# Altium footprint library FT8.PcbLib: 40 footprints (part 1 of 3)
Each footprint in its own frame and in the unit in brackets; x right, y up, seen from the top. Pads: shape width x height; smd on the part's side, far side on the other; paste and mask are expansions set on the pad; w line width, h text height; cw(c..) or ccw(c..) is an arc to the next point about the centre after c.
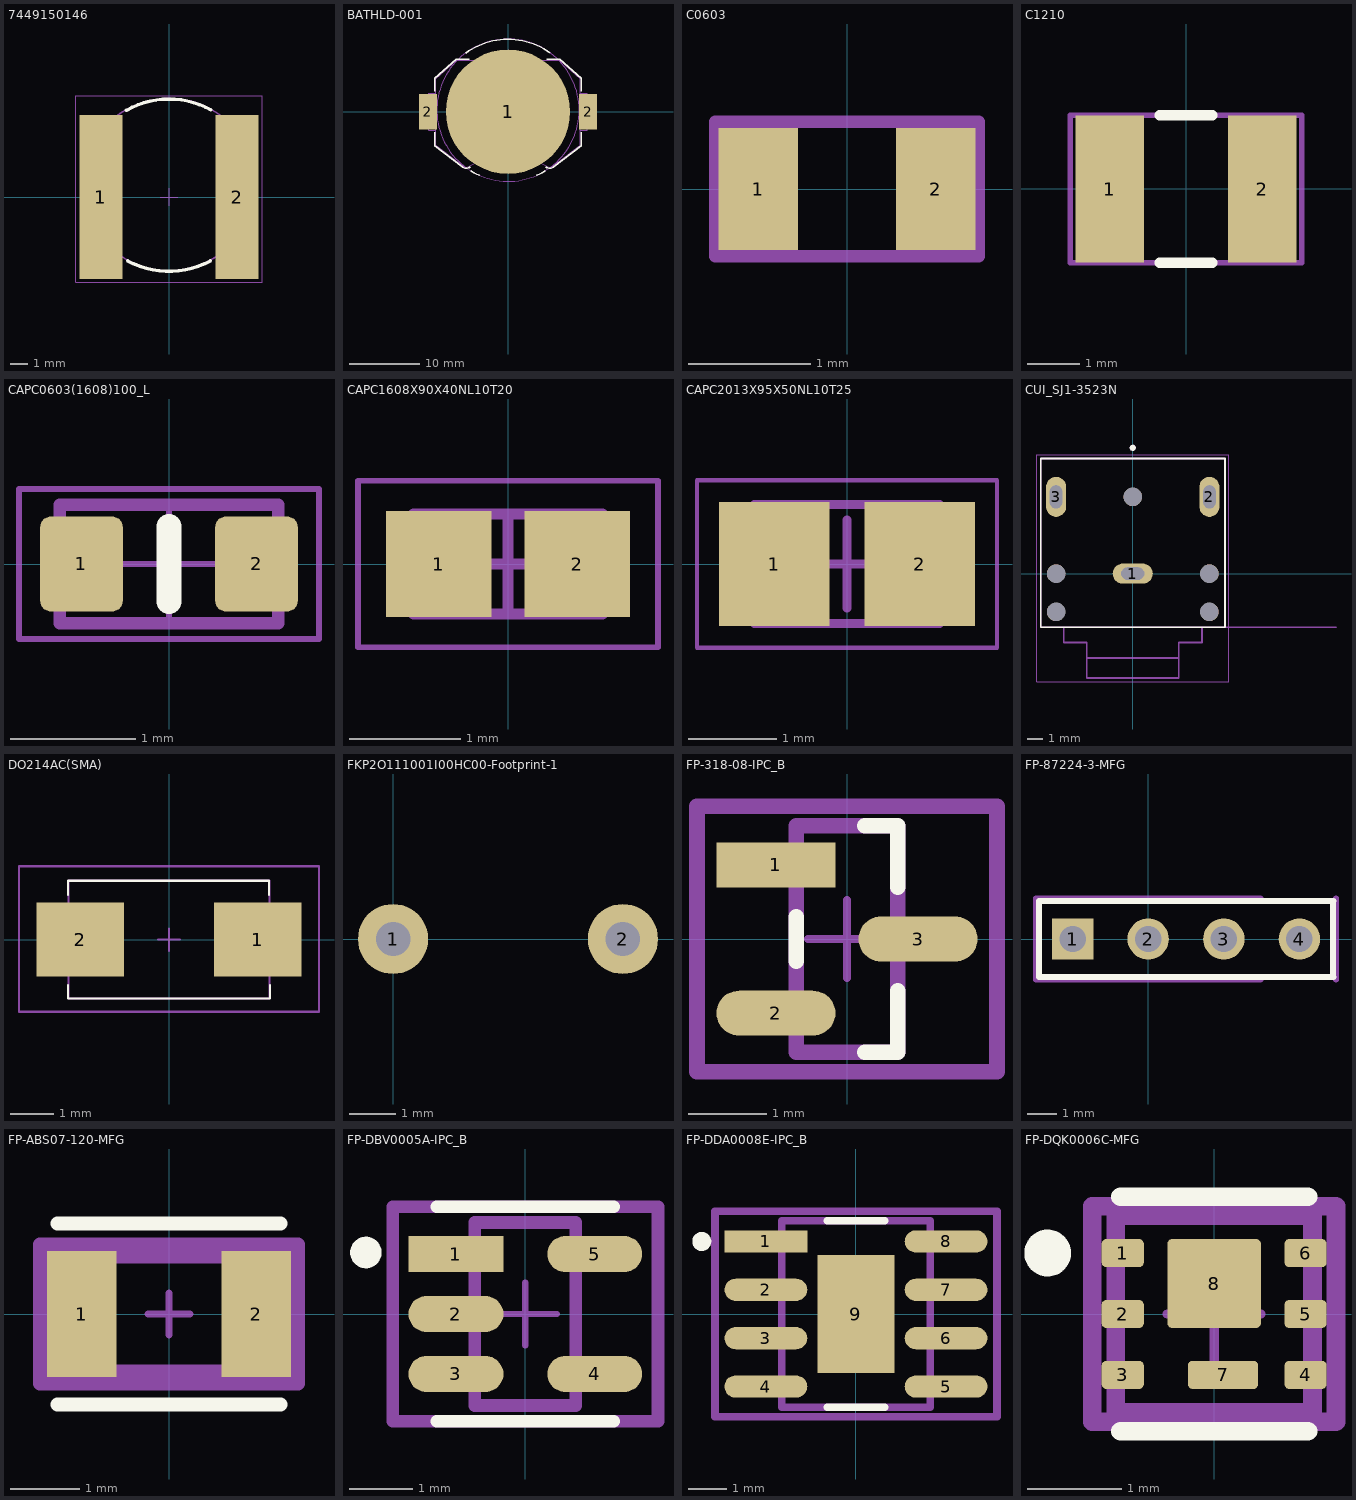
[diagram p0: the footprints below, top view; thin cyan lines are the x and y axes]

## 7449150146 [mm] "Air Coil High Current Inductor, size 1010"
height 6.5
pads (2):
  rect 2.5x9.5 smd: 1(-3.95,0) 2(3.95,0)
Top Overlay:
  lines w0.2: -2.474,5.03 cw(c0,0.685) 2.43,5.055 ; -2.401,-3.701 ccw(c0,0.685) 2.401,-3.701
Top 3D Body:
  circle w0.1: c0,0.725 r5
  lines w0.1: -3.525,4.275 -5,4.275 -5,-4.275 -3.2,-4.275 -3.2,-3.15 ; 3.2,-3.15 3.2,-4.275 5,-4.275 5,4.275 3.525,4.275
Top Designator:
  text ".Designator" at -7.498,-0.5 h1.5
Top Courtyard:
  lines w0.05: -0.5,0 0.5,0 ; 0,-0.5 0,0.5 ; -5.4,-4.95 5.4,-4.95 5.4,5.885 -5.4,5.885 -5.4,-4.95
Top Component Outline:
  circle w0.1: c0,0.725 r5
  lines w0.1: -3.525,4.275 -5,4.275 -5,-4.275 -3.2,-4.275 -3.2,-3.15 ; 3.2,-3.15 3.2,-4.275 5,-4.275 5,4.275 3.525,4.275
3D body "7449150146.stp": height 6.26, standoff 0.01, extent -5,-4.275 5,5.725

## BATHLD-001 [mm] "LINX CR2032 BATTERY HOLDER"
height 4.3
pads (3):
  round 17.78 smd: 1(0,0)
  rect 2.54x5.08 smd: 2(-11.43,0) 2(11.43,0)
Top Overlay:
  lines w0.2: -10.466,-2.94 -10.466,-4.853 -6.545,-7.854 ; -10.466,2.94 -10.466,4.785 -7.425,7.475 -5.515,7.476 ; -6.545,-7.854 ccw(c-5.97,-7.277) -5.561,-7.982 cw(c0.254,-19.539) -5.394,-7.899 ; -6.041,8.364 cw(c0,0.19) 5.977,8.411 ; -5.313,-8.454 ccw(c0,0.215) -4.054,-9.109 ; 4.054,-9.109 ccw(c0,0.215) 5.313,-8.454 ; 5.394,-7.899 cw(c-0.254,-19.539) 5.561,-7.982 ccw(c5.97,-7.277) 6.545,-7.854 ; 5.515,7.476 7.425,7.475 10.466,4.785 10.466,2.94 ; 6.545,-7.854 10.466,-4.853 ; 10.466,-4.852 10.466,-2.94
Mechanical 1:
  circle w0.1: c0,0.215 r10.168
Top Assembly:
  lines w0.1: -10.326,-2.625 -11.316,-2.625 -11.316,-0.525 -10.316,-0.525 ; -10.316,0.525 -11.316,0.525 -11.316,2.625 -10.316,2.625 ; -6.038,-8.055 cw(c-0.031,-19.513) 6.013,-8.074 ; -6.038,-8.056 -10.316,-4.775 -10.316,4.725 -7.366,7.325 7.366,7.325 10.316,4.725 10.316,-4.775 6.013,-8.075 ; 10.316,-0.525 11.316,-0.525 11.316,-2.625 10.326,-2.625 ; 10.316,0.525 11.316,0.525 11.316,2.625 10.316,2.625
Top Courtyard:
  lines w0.1: -0.5,0 0.5,0 ; 0,-0.5 0,0.5
3D body: height 4, standoff 0, extent -10.168,-9.953 10.168,10.383
3D body: height 4.3, standoff 0, extent -10.317,-8.075 10.317,7.326

## C0603 [mm]
pads (2):
  rect 0.65x1 smd: 1(-0.725,0) 2(0.725,0)
Bottom 3D Body:
  text ".Comment" at -0.6,-0.3 h0.8
Mechanical 7:
  text ".Designator" at -0.7,-0.3 h0.8
Top Courtyard:
  lines w0.1: -1.075,-0.55 -1.075,0.55 1.075,0.55 1.075,-0.55 -1.075,-0.55
3D body "cap_cera_0603.step": height 0.8, standoff 0, extent -0.8,-0.4 0.8,0.4

## C1210 [mm]
pads (2):
  rect 1.3x2.8 smd: 1(-1.45,0) 2(1.45,0)
Top Overlay:
  lines w0.2: -0.5,-1.4 0.5,-1.4 ; -0.5,1.4 0.5,1.4
Bottom 3D Body:
  text ".Comment" at 0.55,0.35 h0.8
Mechanical 7:
  text ".Designator" at 0.9,0.4 h0.8
Top Courtyard:
  lines w0.1: -2.2,-1.4 -2.2,1.4 2.2,1.4 2.2,-1.4 -2.2,-1.4
3D body "cap_cera_1210.step": height 2.5, standoff 0, extent -1.6,-1.25 1.6,1.25

## CAPC0603(1608)100_L [mm] "Chip Capacitor, Body 1.6x0.8mm, Height 1.0mm, IPC High Density"
height 1
pads (2):
  rrect25% 0.66x0.76 smd: 1(-0.7,0) 2(0.7,0)
Top Overlay:
  lines w0.2: 0,-0.3 0,0.3
Top Designator:
  text ".Designator" at -1.27,-0.127 h0.6
Top Assembly:
  lines w0.1: -0.875,-0.475 -0.875,0.475 0.875,0.475 0.875,-0.475 -0.875,-0.475
Top Courtyard:
  lines w0.05: -0.475,0 0.475,0 ; 0,-0.475 0,0.475 ; -1.2,-0.6 1.2,-0.6 1.2,0.6 -1.2,0.6 -1.2,-0.6
3D body "CAPC1608X95N EIA 0603.STEP": height 0.95, standoff 0, extent -0.8,-0.4 0.8,0.4

## CAPC1608X90X40NL10T20 [mm] "Chip Capacitor, 2-Leads, Body 1.70x0.90mm, IPC Medium Density"
height 0.9
pads (2):
  rect 0.95x0.95 smd: 1(-0.625,0) 2(0.625,0)
Top Assembly:
  lines w0.1: -0.85,-0.45 -0.85,0.45 0.85,0.45 0.85,-0.45 -0.85,-0.45
Top Courtyard:
  lines w0.05: -1.35,-0.75 -1.35,0.75 1.35,0.75 1.35,-0.75 -1.35,-0.75
  lines w0.1: -0.45,0 0.45,0 ; 0,-0.45 0,0.45
3D body "CAPC1608X09N.step": height 0.9, standoff 0, extent -0.85,-0.45 0.85,0.45

## CAPC2013X95X50NL10T25 [mm] "Chip Capacitor, 2-Leads, Body 2.10x1.35mm, IPC Medium Density"
height 0.95
pads (2):
  rect 1.25x1.4 smd: 1(-0.825,0) 2(0.825,0)
Top Assembly:
  lines w0.1: -1.05,-0.675 1.05,-0.675 1.05,0.675 -1.05,0.675 -1.05,-0.675
Top Courtyard:
  lines w0.05: -1.7,-0.95 1.7,-0.95 1.7,0.95 -1.7,0.95 -1.7,-0.95
  lines w0.1: -0.5,0 0.5,0 ; 0,-0.5 0,0.5
3D body "CAPC2012X09N.step": height 0.95, standoff 0, extent -1.05,-0.675 1.05,0.675

## CUI_SJ1-3523N [mm]
height 6.25
pads (8):
  oval 2.616x1.308 hole 0.8 slot 1.5 at 0 deg: 1(0,0)
  oval 1.308x2.616 hole 0.8 slot 1.5 at 90 deg: 2(5,5) 3(-5,5)
  round 1.2 hole 1.2 unplated: ""(-5,-2.5) ""(-5,0) ""(0,5) ""(5,-2.5) ""(5,0)
Top Overlay:
  circle w0.2: c0,8.2 r0.1
  lines w0.127: -6,-3.5 -6,7.5 6,7.5 6,-3.5 -6,-3.5
Top Assembly:
  circle w0.2: c0,8.2 r0.1
  lines w0.127: 13.25,-3.5 6,-3.5 ; -4.5,-3.5 -6,-3.5 -6,7.5 6,7.5 6,-3.5 ; -4.5,-3.5 4.5,-3.5 ; -4.5,-3.5 -4.5,-4.5 -3,-4.5 -3,-5.5 ; -3,-5.5 -3,-6.8 3,-6.8 3,-5.5 ; -3,-5.5 3,-5.5 ; 3,-5.5 3,-4.5 4.5,-4.5 4.5,-3.5 ; 4.5,-3.5 6,-3.5
  text "PCB EDGE" at 7,-3.25 h0.81
Top Courtyard:
  lines w0.05: -6.25,-7.05 6.25,-7.05 6.25,7.75 -6.25,7.75 -6.25,-7.05
3D body "SJ1-3523N--3DModel-STEP-1.STEP": height 5.8, standoff -2.7, extent -6,-6.807 6,7.493

## DO214AC(SMA) [mm] "Magnetic-Core Inductor with Winding Polarity Marking; 2 Leads"
height 0.55
pads (2):
  rect 2x1.7 smd: 1(2.025,0) 2(-2.025,0)
Top Overlay:
  lines w0.05: -2.311,-1.041 -2.311,-1.346 2.311,-1.346 2.311,-1.041 ; -2.311,1.016 -2.311,1.346 2.286,1.346 2.286,1.016
Mechanical 1:
  lines w0.05: -2.3,-1.35 2.3,-1.35 2.3,1.35 -2.3,1.35 -2.3,-1.35
Top Courtyard:
  lines w0.05: -0.254,0 0.254,0 ; 0,-0.254 0,0.254 ; -3.429,-1.651 3.429,-1.651 3.429,1.676 -3.429,1.676 -3.429,-1.651
3D body "DO-214AC.STEP": height 2.4, standoff 0, extent -2.3,-1.35 2.3,1.35

## FKP2O111001I00HC00-Footprint-1 [mil]
pads (2):
  round 60 hole 29.53: 1(0,0) 2(196.85,0)

## FP-318-08-IPC_B [mm]
pads (3):
  rect 1.524x0.578 smd paste+0 mask+0: 1(-0.91,0.95)
  rrect100% 1.524x0.578 smd paste+0 mask+0: 2(-0.91,-0.95) 3(0.91,0)
Top Overlay:
  lines w0.2: -0.65,-0.286 -0.65,0.286 ; 0.227,-1.45 0.65,-1.45 0.65,-0.664 ; 0.227,1.45 0.65,1.45 0.65,0.664
Top 3D Body:
  lines w0.2: -0.65,-1.45 0.65,-1.45 0.65,1.45 -0.65,1.45 -0.65,-1.45
Top Component Center:
  lines w0.1: -0.5,0 0.5,0 ; 0,-0.5 0,0.5
Top Assembly:
  lines w0.2: -1.922,-1.7 1.922,-1.7 1.922,1.7 -1.922,1.7 -1.922,-1.7
  text ".Designator" at 0,-0.001 h1
Top Courtyard:
  lines w0.2: -1.922,-1.7 1.922,-1.7 1.922,1.7 -1.922,1.7 -1.922,-1.7
3D body "Trans_ON_Semiconductor_2N7002K_eec.STEP": height 0.25, standoff 0, extent -1.922,-1.7 1.922,1.7

## FP-87224-3-MFG [mil]
pads (4):
  rect 54.69x54.69 hole 35 paste-99999 mask+0: 1(-100,0)
  round 54.69 hole 35 paste-99999 mask+0: 2(0,0) 3(100,0) 4(200,0)
Top Overlay:
  lines w7.87: 244.55,-50.05 244.55,50.05 ; 245,-50.05 -144.55,-50.05 -144.55,50.05 245,50.05
Top 3D Body:
  lines w7.87: 244.5,-50 244.5,50 ; 245,-50 -144.5,-50 -144.5,50 245,50
Top Component Center:
  lines w3.94: -19.68,0 19.68,0 ; 0,-19.68 0,19.68
Top Assembly:
  lines w7.87: 148.44,-53.94 -148.44,-53.94 -148.44,53.94 148.44,53.94 ; 248.44,-53.94 248.44,53.94
  text ".Designator" at 0,-0.02 h39.37
Top Courtyard:
  lines w7.87: 148.44,-53.94 -148.44,-53.94 -148.44,53.94 148.44,53.94 ; 248.44,-53.94 248.44,53.94

## FP-ABS07-120-MFG [mm]
pads (2):
  rect 1x1.8 smd paste+0 mask+0: 1(-1.25,0) 2(1.25,0)
Top Overlay:
  lines w0.2: -1.6,-1.3 1.6,-1.3 ; -1.6,1.3 1.6,1.3
Top 3D Body:
  lines w0.2: -1.675,-0.825 1.675,-0.825 1.675,0.825 -1.675,0.825 -1.675,-0.825
Top Component Center:
  lines w0.1: -0.3,0 0.3,0 ; 0,-0.3 0,0.3
Top Assembly:
  lines w0.2: -1.85,-1 1.85,-1 1.85,1 -1.85,1 -1.85,-1
  text ".Designator" at 0,-0.001 h1
Top Courtyard:
  lines w0.2: -1.85,-1 1.85,-1 1.85,1 -1.85,1 -1.85,-1
3D body "Crys_Abracon_ABS07-120-32_768KHZ-T_eec.STEP": height 0.25, standoff 0, extent -1.85,-1 1.85,1

## FP-DBV0005A-IPC_B [mm]
pads (5):
  rect 1.505x0.572 smd paste+0 mask+0: 1(-1.1,0.95)
  rrect100% 1.505x0.572 smd paste+0 mask+0: 2(-1.1,0) 3(-1.1,-0.95) 4(1.1,-0.95) 5(1.1,0.95)
Top Overlay:
  circle w0.25: c-2.528,0.975 r0.125
  lines w0.2: -1.4,-1.7 1.4,-1.7 ; -1.4,1.7 1.4,1.7
Top 3D Body:
  lines w0.2: -0.8,-1.45 0.8,-1.45 0.8,1.45 -0.8,1.45 -0.8,-1.45
Top Component Center:
  lines w0.1: -0.5,0 0.5,0 ; 0,-0.5 0,0.5
Top Assembly:
  lines w0.2: -2.103,-1.7 2.103,-1.7 2.103,1.7 -2.103,1.7 -2.103,-1.7
  text ".Designator" at 0,-0.001 h1
Top Courtyard:
  lines w0.2: -2.103,-1.7 2.103,-1.7 2.103,1.7 -2.103,1.7 -2.103,-1.7
3D body "IC_Texas_Instruments_SN74AHC1G00DBVR_eec.STEP": height 0.25, standoff 0, extent -2.103,-1.7 2.103,1.7

## FP-DDA0008E-IPC_B [mm]
pads (9):
  rect 2.174x0.582 smd paste+0 mask+0: 1(-2.366,1.905)
  rrect100% 2.174x0.582 smd paste+0 mask+0: 2(-2.366,0.635) 3(-2.366,-0.635) 4(-2.366,-1.905) 5(2.366,-1.905) 6(2.366,-0.635) 7(2.366,0.635) 8(2.366,1.905)
  rect 2.025x3.1 smd paste-1000 mask+0: 9(0,0)
Top Overlay:
  circle w0.25: c-4.05,1.905 r0.125
  lines w0.2: -0.75,-2.45 0.75,-2.45 ; -0.75,2.45 0.75,2.45
Top Paste:
  rectangle: -0.568,-1.105 0.568,1.105
Top 3D Body:
  lines w0.2: -1.95,-2.45 1.95,-2.45 1.95,2.45 -1.95,2.45 -1.95,-2.45
Top Component Center:
  lines w0.1: -0.5,0 0.5,0 -0.5,0 ; 0,-0.5 0,0.5 0,-0.5
Top Assembly:
  lines w0.2: -3.703,-2.7 3.703,-2.7 3.703,2.7 -3.703,2.7 -3.703,-2.7
  text ".Designator" at 0,-0.001 h1
Top Courtyard:
  lines w0.2: -3.703,-2.7 3.703,-2.7 3.703,2.7 -3.703,2.7 -3.703,-2.7
3D body "IC_Texas_Instruments_LM5164DDAR_eec.STEP": height 0.25, standoff 0, extent -3.703,-2.7 3.703,2.7

## FP-DQK0006C-MFG [mm]
pads (8):
  rrect33% 0.45x0.3 smd paste+0 mask+0: 1(-0.975,0.65) 2(-0.975,0) 3(-0.975,-0.65) 4(0.975,-0.65) 5(0.975,0) 6(0.975,0.65)
  rrect33% 0.75x0.3 smd paste-1000 mask+0: 7(0.095,-0.65)
  rrect11% 1x0.95 smd paste-1000 mask+0: 8(0,0.325)
Top Overlay:
  circle w0.25: c-1.775,0.65 r0.125
  lines w0.2: -1,-1.25 1,-1.25 ; -1,1.25 1,1.25
Top Paste:
  region: 0.4,0.755 0.41,0.755 0.428,0.747 0.442,0.733 0.45,0.715 0.45,0.705 0.45,-0.055 0.45,-0.065 0.442,-0.083 0.428,-0.097 0.41,-0.105 0.4,-0.105 -0.4,-0.105 -0.41,-0.105 -0.428,-0.097 -0.442,-0.083 -0.45,-0.065 -0.45,-0.055 -0.45,0.705 -0.45,0.715 -0.442,0.733 -0.428,0.747 -0.41,0.755 -0.4,0.755
  region: 0.395,-0.505 0.405,-0.505 0.423,-0.513 0.437,-0.527 0.445,-0.545 0.445,-0.555 0.445,-0.745 0.445,-0.755 0.437,-0.773 0.423,-0.787 0.405,-0.795 0.395,-0.795 -0.205,-0.795 -0.215,-0.795 -0.233,-0.787 -0.247,-0.773 -0.255,-0.755 -0.255,-0.745 -0.255,-0.555 -0.255,-0.545 -0.247,-0.527 -0.233,-0.513 -0.215,-0.505 -0.205,-0.505
Top 3D Body:
  lines w0.2: -1.05,-1.05 1.05,-1.05 1.05,1.05 -1.05,1.05 -1.05,-1.05
Top Component Center:
  lines w0.1: -0.5,0 0.5,0 ; 0,-0.5 0,0.5
Top Assembly:
  lines w0.2: -1.3,-1.15 1.3,-1.15 1.3,1.15 -1.3,1.15 -1.3,-1.15
  text ".Designator" at 0,-0.001 h1
Top Courtyard:
  lines w0.2: -1.3,-1.15 1.3,-1.15 1.3,1.15 -1.3,1.15 -1.3,-1.15
3D body "Trans_Texas_Instruments_CSD13202Q2_eec.STEP": height 0.25, standoff 0, extent -1.3,-1.15 1.3,1.15